# Altium footprint library KIT_ARDUINO_R00.PcbLib: 13 footprints
Each footprint in its own frame and in the unit in brackets; x right, y up, seen from the top. Pads: shape width x height; smd on the part's side, far side on the other; paste and mask are expansions set on the pad; w line width, h text height; cw(c..) or ccw(c..) is an arc to the next point about the centre after c.
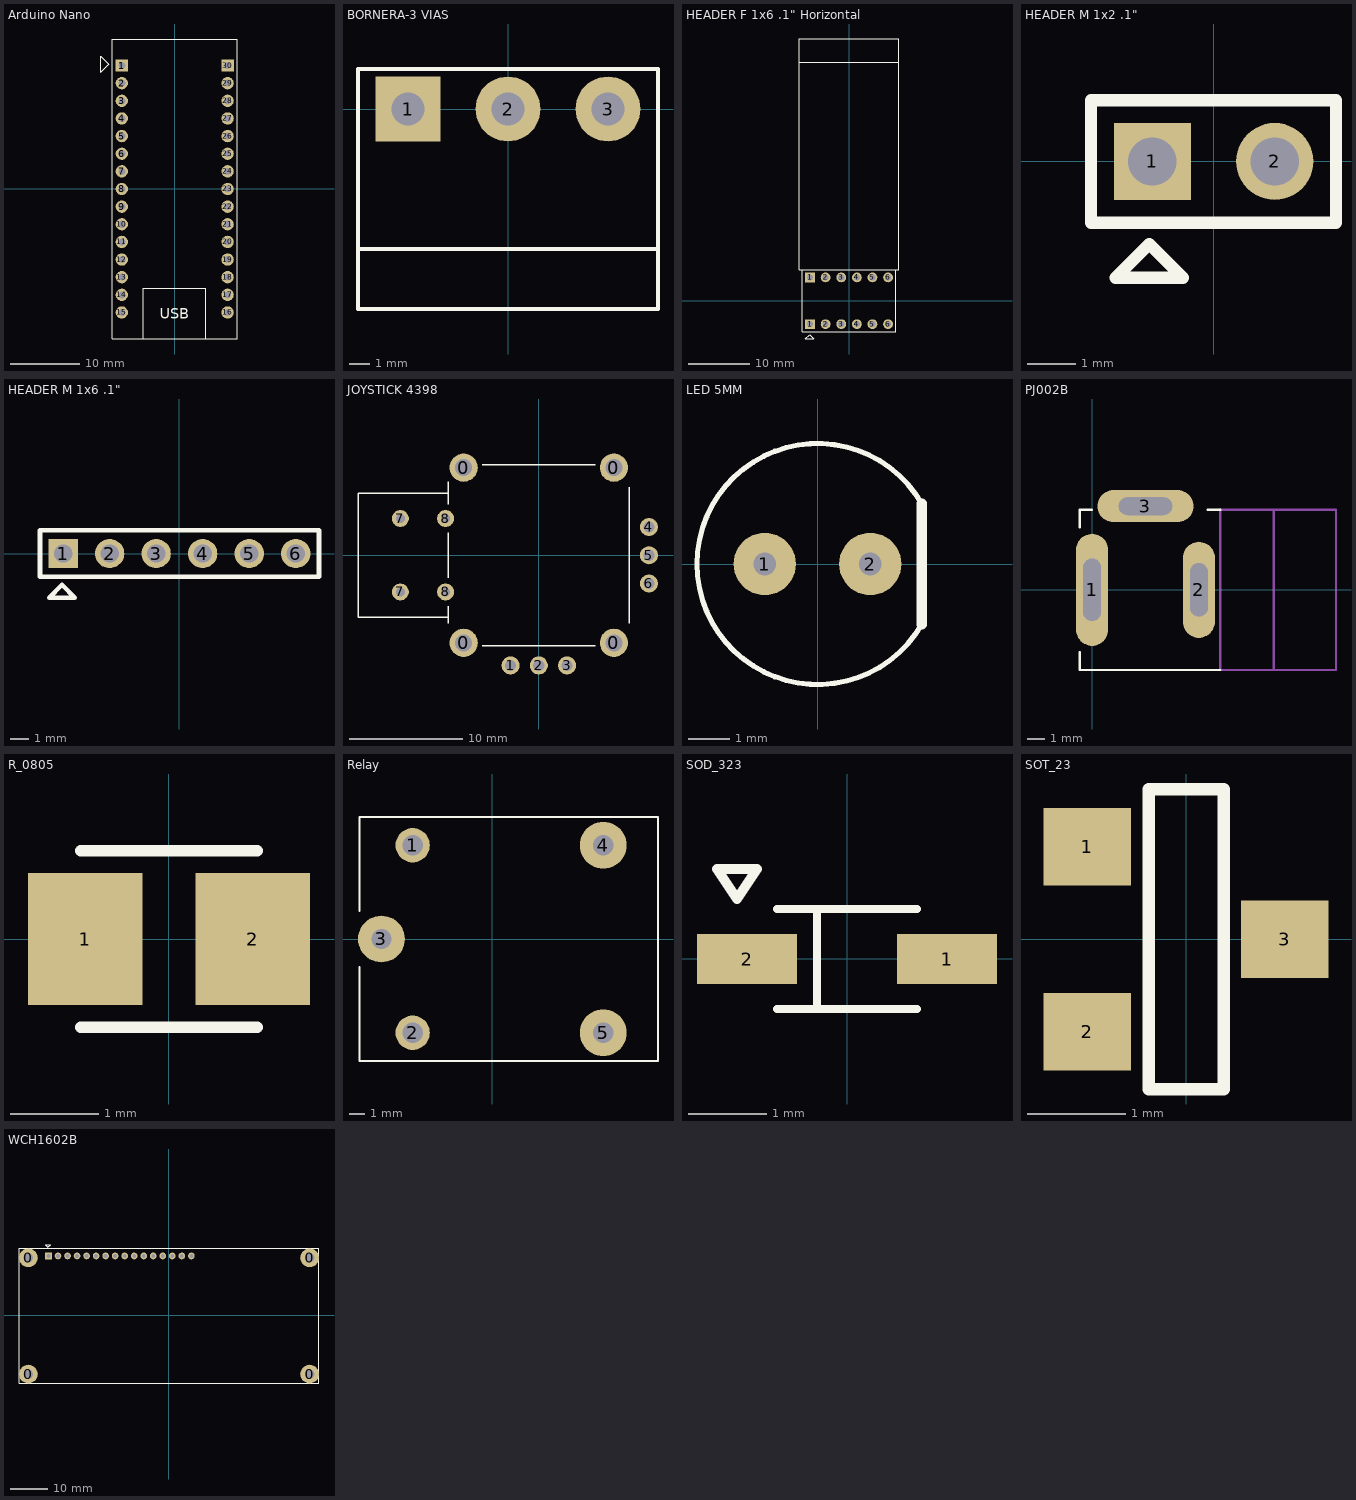
[diagram p0: the footprints below, top view; thin cyan lines are the x and y axes]

## Arduino Nano [mil]
pads (30):
  rect 70x70 hole 40: 1(-300,700) 30(300,700)
  round 70 hole 40: 2(-300,600) 3(-300,500) 4(-300,400) 5(-300,300) 6(-300,200) 7(-300,100) 8(-300,0) 9(-300,-100) 10(-300,-200) 11(-300,-300) 12(-300,-400) 13(-300,-500) 14(-300,-600) 15(-300,-700) 16(300,-700) 17(300,-600) 18(300,-500) 19(300,-400) 20(300,-300) 21(300,-200) 22(300,-100) 23(300,0) 24(300,100) 25(300,200) 26(300,300) 27(300,400) 28(300,500) 29(300,600)
Top Overlay:
  lines w5: -419,661.7 -373.9,706.8 -418.9,751.8 -418.9,661.7 ; -177.17,-850.4 -177.17,-563 177.16,-563 177.17,-850.39 ; -354.33,-850.39 -354.33,850.39 354.33,850.39 354.33,-850.39 -354.33,-850.39
  text "USB" at -83.7,-737 h60

## BORNERA-3 VIAS [mm]
height 1.2
pads (3):
  rect 3.25x3.25 hole 1.65: 1(-5,0)
  round 3.25 hole 1.65: 2(0,0) 3(5,0)
Top Overlay:
  lines w0.203: -7.5,-7 7.5,-7 ; -7.5,-10 -7.5,2 7.5,2 7.5,-10 -7.5,-10
3D body "282814-3--3DModel-STEP-1.STEP": height 8.75, standoff -3.1, extent -8.195,-10.15 7.545,1.85

## HEADER F 1x6 .1" Horizontal [mm]
pads (12):
  rect 1.6x1.6 hole 1: 1(-6.35,-3.81) 1(-6.35,3.81)
  round 1.6 hole 1: 2(-3.81,-3.81) 2(-3.81,3.81) 3(-1.27,-3.81) 3(-1.27,3.81) 4(1.27,-3.81) 4(1.27,3.81) 5(3.81,-3.81) 5(3.81,3.81) 6(6.35,-3.81) 6(6.35,3.81)
Top Overlay:
  lines w0.152: -8.1,38.8 8.1,38.8 ; -7.62,5.08 -7.62,-5.08 7.62,-5.08 7.62,5.08 ; 8.1,5.08 -8.1,5.08 -8.1,42.6 8.1,42.6 ; 8.1,5.1 8.1,42.58 8.1,5.56 ; -7.112,-6.223 -5.715,-6.223 -6.413,-5.524 -7.112,-6.223

## HEADER M 1x2 .1" [mm]
pads (2):
  rect 1.6x1.6 hole 1: 1(-1.27,0)
  round 1.6 hole 1: 2(1.27,0)
Top Overlay:
  lines w0.254: -2.54,-1.27 -2.54,1.27 2.54,1.27 2.54,-1.27 -2.54,-1.27 ; -2.032,-2.413 -0.635,-2.413 -1.333,-1.714 -2.032,-2.413

## HEADER M 1x6 .1" [mm]
pads (6):
  rect 1.6x1.6 hole 1: 1(-6.35,0)
  round 1.6 hole 1: 2(-3.81,0) 3(-1.27,0) 4(1.27,0) 5(3.81,0) 6(6.35,0)
Top Overlay:
  lines w0.254: -7.62,-1.27 -7.62,1.27 7.62,1.27 7.62,-1.27 -7.62,-1.27 ; -7.112,-2.413 -5.715,-2.413 -6.413,-1.714 -7.112,-2.413

## JOYSTICK 4398 [mm]
pads (14):
  round 2.5 hole 1.5: 0(-6.65,-7.75) 0(-6.65,7.75) 0(6.65,-7.75) 0(6.65,7.75)
  round 1.6 hole 1: 1(-2.5,-9.75) 2(0,-9.75) 3(2.5,-9.75) 4(9.75,2.5) 5(9.75,0) 6(9.75,-2.5)
  round 1.5 hole 0.8: 7(-12.25,-3.25) 7(-12.25,3.25) 8(-8.25,-3.25) 8(-8.25,3.25)
Top Overlay:
  lines w0.127: -8,-6 -8,-4.5 ; -8,-5.5 -16,-5.5 -16,5.5 -8,5.5 ; -8,-2 -8,2 ; -8,4.5 -8,6.5 ; -5,-8 5,-8 ; -5,8 5,8 ; 8,-6 8,6

## LED 5MM [mm]
pads (2):
  round 1.5 hole 0.55: 1(-1.27,0) 2(1.27,0)
Top Overlay:
  lines w0.127: 2.511,-1.45 cw(c0,0) 2.511,1.45
  lines w0.254: 2.511,-1.45 2.511,1.45

## PJ002B [mm] "Power Jack 2.1mm"
pads (3):
  oval 1.8x6.3 hole 1 slot 3.5 at 90 deg: 1(0,0)
  oval 1.8x5.4 hole 1 slot 3 at 90 deg: 2(6,0)
  oval 5.4x1.8 hole 1 slot 3 at 0 deg: 3(3,4.7)
Top Overlay:
  lines w0.127: -0.7,-3.5 -0.7,-4.5 7.2,-4.5 ; -0.7,3.5 -0.7,4.5 0,4.5 ; 6.5,4.5 7.2,4.5
Mechanical 4:
  lines w0.127: 10.2,-4.5 10.2,4.5 ; 7.2,-4.5 13.7,-4.5 13.7,4.5 7.2,4.5 7.2,-4.5
3D body "User Library-PJ-002AH.STEP": height 11.05, standoff -3.45, extent -0.7,-4.7 13.7,4.7

## R_0805 [mm]
pads (2):
  rect 1.3x1.5 smd: 1(-0.95,0) 2(0.95,0)
Top Overlay:
  lines w0.127: -1,-1 1,-1 ; -1,1 1,1
3D body "Resitor_0805_SMD.STEP": height 0.76, standoff 0, extent -1.15,-0.675 1.15,0.675

## Relay [mm]
pads (5):
  round 2.2 hole 1.3: 1(-5.1,6) 2(-5.1,-6)
  round 3 hole 1.3: 3(-7.1,0) 4(7.1,6) 5(7.1,-6)
Top Overlay:
  lines w0.127: -8.5,-1.8 -8.5,-7.8 10.6,-7.8 10.6,7.8 -8.5,7.8 -8.5,1.8
3D body: height 15.3, standoff 0, extent -8.5,-7.75 10.5,7.75

## SOD_323 [mil]
height 47.24
pads (2):
  rect 50x25 smd: 1(50,0) 2(-50,0)
Top Overlay:
  lines w4: -35,-25 35,-25 ; -35,25 35,25 ; -15,-25 -15,25
  lines w4.92: -65,45 -55,30 -45,45 -65,45
3D body "User Library-SOD-323.STEP": height 43.41, standoff 0, extent -51.18,-26.58 51.18,26.58

## SOT_23 [mil]
height 35.43
pads (3):
  rect 35x31 smd: 1(-39.5,37) 2(-39.5,-37) 3(39.5,0)
Top Overlay:
  lines w5: -15,-60 15,-60 15,60 -15,60 -15,-60
3D body "User Library-3-lead sot23-3.STEP": height 41.34, standoff 1.18, extent -49.21,-57.48 48.27,57.48

## WCH1602B [mm]
pads (20):
  round 5 hole 2.5 unplated: 0(-37.5,-15.75) 0(-37.5,15.25) 0(37.5,-15.75) 0(37.5,15.25)
  rect 1.778x1.778 hole 1.016: 1(-32.14,15.75)
  round 1.778 hole 1.016: 2(-29.6,15.75) 3(-27.06,15.75) 4(-24.52,15.75) 5(-21.98,15.75) 6(-19.44,15.75) 7(-16.9,15.75) 8(-14.36,15.75) 9(-11.82,15.75) 10(-9.28,15.75) 11(-6.74,15.75) 12(-4.2,15.75) 13(-1.66,15.75) 14(0.88,15.75) 15(3.42,15.75) 16(5.96,15.75)
Top Overlay:
  lines w0.127: -40,-18.25 40,-18.25 40,17.75 -40,17.75 -40,-18.25 ; -33.033,18.786 -32.271,18.024 -31.509,18.786 -33.033,18.786